# Altium footprint library IC.PcbLib: 204 footprints (part 2 of 13)
Each footprint in its own frame and in the unit in brackets; x right, y up, seen from the top. Pads: shape width x height; smd on the part's side, far side on the other; paste and mask are expansions set on the pad; w line width, h text height; cw(c..) or ccw(c..) is an arc to the next point about the centre after c.
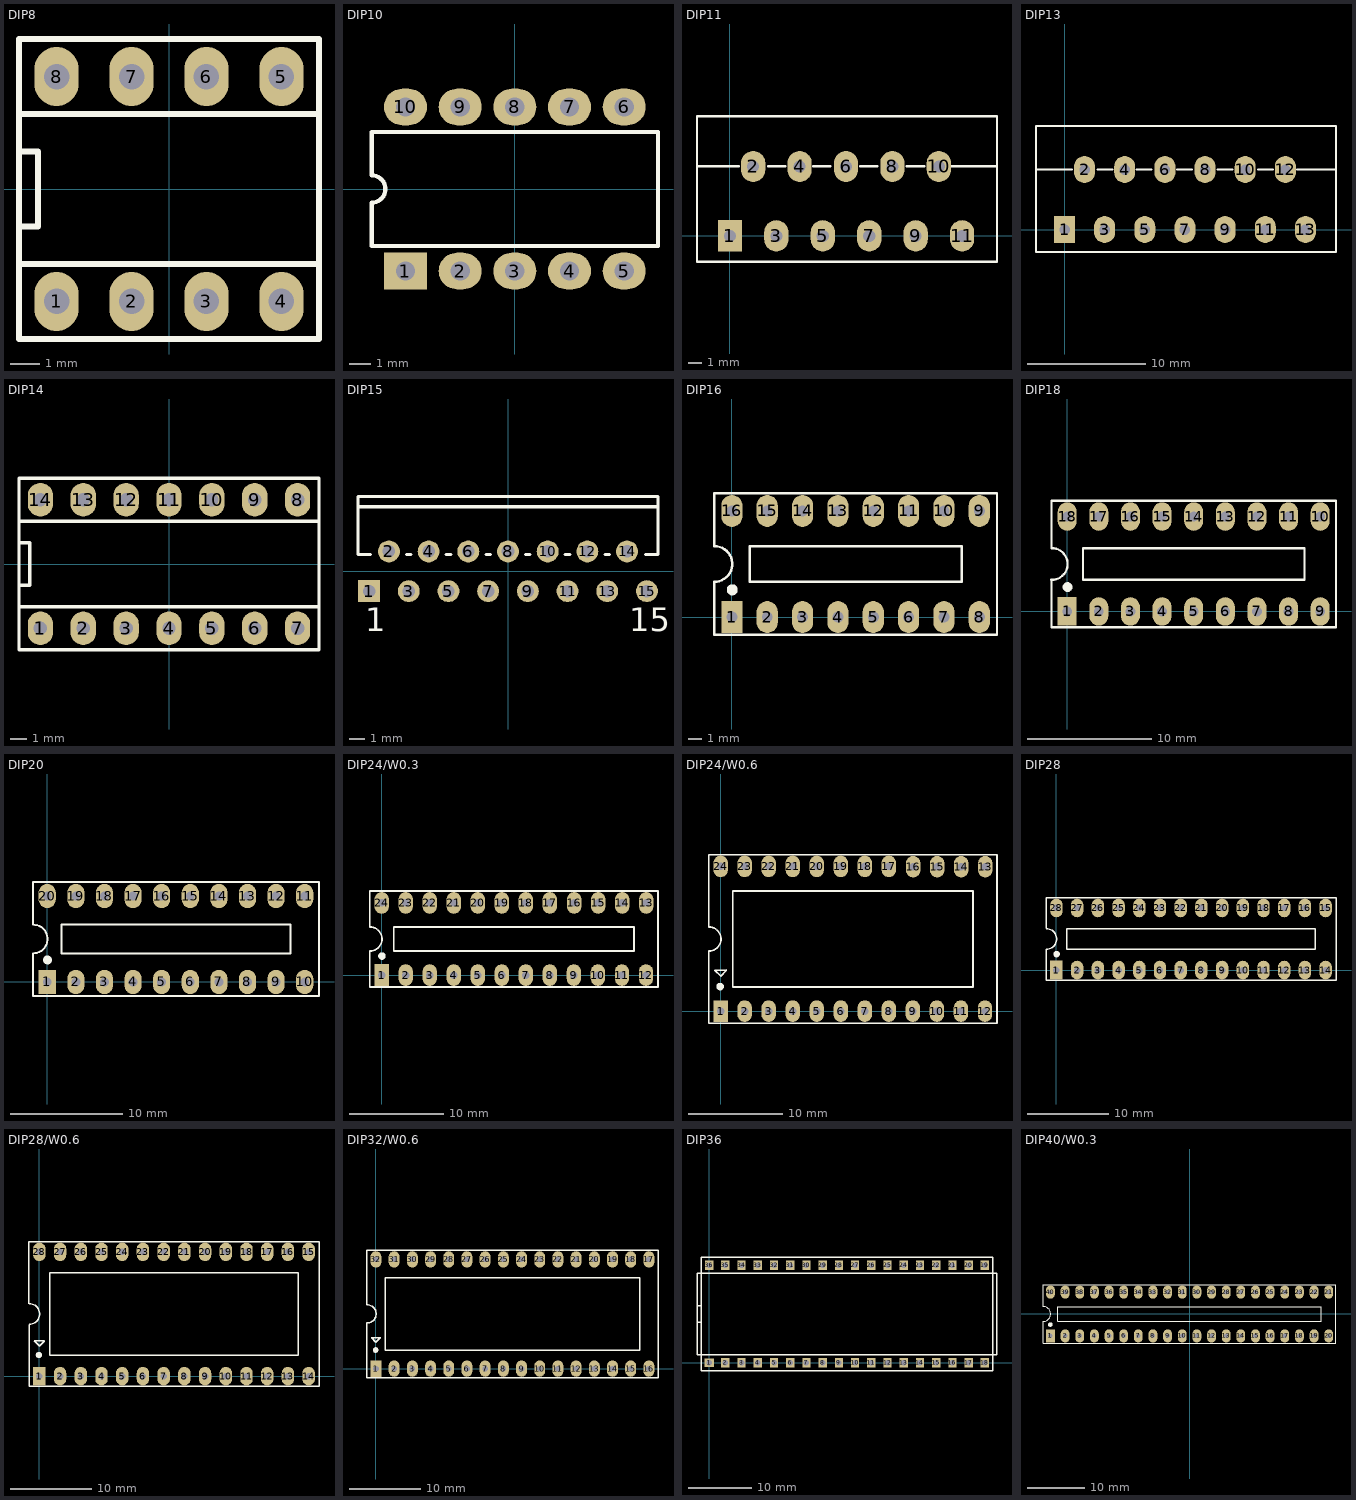
[diagram p1: the footprints below, top view; thin cyan lines are the x and y axes]

## DIP8 [mm] "W.300/L.400"
pads (8):
  oval 1.5x2 hole 0.864: 1(-3.81,-3.81) 2(-1.27,-3.81) 3(1.27,-3.81) 4(3.81,-3.81) 5(3.81,3.81) 6(1.27,3.81) 7(-1.27,3.81) 8(-3.81,3.81)
Top Overlay:
  lines w0.203: -5.08,-2.54 5.08,-2.54 ; -5.08,-2.54 -5.08,2.54 ; -5.08,-2.54 5.08,-2.54 ; -5.08,-2.54 -5.08,2.54 ; -5.08,-2.54 -5.08,-5.08 5.08,-5.08 5.08,2.54 ; -5.08,-2.54 -5.08,-1.27 ; -5.08,-1.27 -4.445,-1.27 ; -5.08,-1.27 -4.445,-1.27 ; -5.08,-1.27 -5.08,1.27 ; -5.08,1.27 -4.445,1.27 ; -5.08,1.27 -4.445,1.27 ; -5.08,1.27 -5.08,5.08 5.08,5.08 5.08,2.54 ; -5.08,2.54 5.08,2.54 ; -5.08,2.54 5.08,2.54 ; -4.445,-1.27 -4.445,1.27 ; -4.445,-1.27 -4.445,1.27 ; 5.08,-2.54 5.08,2.54 ; 5.08,-2.54 5.08,2.54
3D body "User Library-DIP8-300-metric.step": height 4.5, standoff -3.5, extent -5.4,-3.88 5.4,3.88

## DIP10 [mm] "DIP; 10 Leads; Row Spacing 7.62 mm; Pitch 2.54 mm"
height 4.42
pads (10):
  rect 2x1.7 hole 0.9: 1(-5.08,-3.81)
  oval 2x1.7 hole 0.9: 2(-2.54,-3.81) 3(0,-3.81) 4(2.54,-3.81) 5(5.08,-3.81) 6(5.08,3.81) 7(2.54,3.81) 8(0,3.81) 9(-2.54,3.81) 10(-5.08,3.81)
Top Overlay:
  lines w0.2: -6.65,-2.65 6.65,-2.65 6.65,2.65 -6.65,2.65 -6.65,0.635 cw(c-6.65,0) -6.65,-0.635 -6.65,-2.65

## DIP11 [mil] "11 Pin so le hai hang cach nhau 200mil., Pin to pin 100mil"
pads (11):
  rect 70x90 hole 35: 1(0,0)
  oval 70x90 hole 35: 2(66.93,200) 3(133.86,0) 4(200.79,200) 5(267.72,0) 6(334.65,200) 7(401.57,0) 8(468.5,200) 9(535.43,0) 10(602.36,200) 11(669.29,0)
Top Overlay:
  lines w7: -95,200 25,200 ; 110,200 160,200 ; 240,200 290,200 ; 375,200 425,200 ; 510,200 560,200 ; 630,200 770,200 ; -95,-75 770,-75 770,345 -95,345 -95,-75

## DIP13 [mil] "13 Pin so le hai hang cach nhau 200mil., Pin to pin 100mil"
pads (13):
  rect 70x90 hole 35: 1(0,0)
  oval 70x90 hole 35: 2(66.93,200) 3(133.86,0) 4(200.79,200) 5(267.72,0) 6(334.65,200) 7(401.57,0) 8(468.5,200) 9(535.43,0) 10(602.36,200) 11(669.29,0) 12(736.22,200) 13(803.15,0)
Top Overlay:
  lines w7: -95,200 25,200 ; 110,200 160,200 ; 240,200 290,200 ; 375,200 425,200 ; 510,200 560,200 ; 645,200 695,200 ; 775,200 905,200 ; -95,-75 905,-75 905,345 -95,345 -95,-75

## DIP14 [mm] "W.300/L.900"
height 5.59
pads (14):
  oval 1.5x2 hole 0.8: 1(-7.62,-3.81) 2(-5.08,-3.81) 3(-2.54,-3.81) 4(0,-3.81) 5(2.54,-3.81) 6(5.08,-3.81) 7(7.62,-3.81) 8(7.62,3.81) 9(5.08,3.81) 10(2.54,3.81) 11(0,3.81) 12(-2.54,3.81) 13(-5.08,3.81) 14(-7.62,3.81)
Top Overlay:
  lines w0.203: -8.89,-2.54 -8.89,-1.27 ; -8.89,-2.54 -8.89,-1.27 ; -8.89,-2.54 8.89,-2.54 ; -8.89,-2.54 8.89,-2.54 ; -8.89,-1.27 -8.255,-1.27 ; -8.89,-1.27 -8.89,1.27 ; -8.89,-1.27 -8.255,-1.27 ; -8.89,-1.27 -8.89,1.27 ; -8.89,1.27 -8.255,1.27 ; -8.89,1.27 -8.89,2.54 ; -8.89,1.27 -8.255,1.27 ; -8.89,1.27 -8.89,2.54 ; -8.89,2.54 8.89,2.54 ; -8.89,2.54 8.89,2.54 ; -8.255,-1.27 -8.255,1.27 ; -8.255,-1.27 -8.255,1.27 ; 8.89,-2.54 8.89,2.54 ; -8.89,-5.08 8.89,-5.08 8.89,5.08 -8.89,5.08 -8.89,-5.08
3D body "User Library-DIP14-300-metric.step": height 4.5, standoff -3.5, extent -9.05,-3.88 9.05,3.88

## DIP15 [mm] "TO, Thru-Hole, Vertical, Heatsink Mounted; 15 Bent Staggered Leads; Pitch 1.27 mm"
height 17.3
pads (15):
  rect 1.4x1.4 hole 0.8: 1(-8.89,-1.27)
  round 1.4 hole 0.8: 2(-7.62,1.27) 3(-6.35,-1.27) 4(-5.08,1.27) 5(-3.81,-1.27) 6(-2.54,1.27) 7(-1.27,-1.27) 8(0,1.27) 9(1.27,-1.27) 10(2.54,1.27) 11(3.81,-1.27) 12(5.08,1.27) 13(6.35,-1.27) 14(7.62,1.27) 15(8.89,-1.27)
Top Overlay:
  lines w0.2: -9.6,4.13 9.6,4.13 ; -8.8,1.08 -9.6,1.08 -9.6,4.78 9.6,4.78 9.6,1.08 8.8,1.08 ; -6.5,1.08 -6.2,1.08 ; -3.96,1.08 -3.66,1.08 ; -1.42,1.08 -1.12,1.08 ; 1.12,1.08 1.42,1.08 ; 3.66,1.08 3.96,1.08 ; 6.2,1.08 6.5,1.08
  text "15" at 7.765,-3.845 h1.5
  text "1" at -9.14,-3.845 h1.5
3D body "User Library-MULTIWAT T15.step": height 22.74, standoff -2.18, extent -9.8,-1.778 9.8,7.29

## DIP16 [mil] "16 PIN, W 300mil, Pin to pin 100mil"
height 100
pads (16):
  rect 60x90 hole 31: 1(0,0)
  oval 60x90 hole 31: 2(100,0) 3(200,0) 4(300,0) 5(400,0) 6(500,0) 7(600,0) 8(700,0) 9(700,300) 10(600,300) 11(500,300) 12(400,300) 13(300,300) 14(200,300) 15(100,300) 16(0,300)
Top Overlay:
  circle w15: c1,77 r8
  lines w7: -50.38,100.05 ccw(c-48.69,150.02) -50,200 ; -50,100 -50,-50 750,-50 750,350 -49,350 -50,349 ; -50,201 -50,350 ; 50,100 50,200 650,200 650,100 50,100
3D body "SW3dPS-DIP 16 _ socket 214.STEP": height 299.42, standoff -131.12, extent -51.7,-57.39 751.7,356

## DIP18 [mil] "18 PIN, W 300mil, Pin to pin 100mil"
height 100
pads (18):
  rect 60x90 hole 31: 1(0,0)
  oval 60x90 hole 31: 2(100,0) 3(200,0) 4(300,0) 5(400,0) 6(500,0) 7(600,0) 8(700,0) 9(800,0) 10(800,300) 11(700,300) 12(600,300) 13(500,300) 14(400,300) 15(300,300) 16(200,300) 17(100,300) 18(0,300)
Top Overlay:
  circle w15: c1,77 r8
  lines w7: -50.38,100.05 ccw(c-48.69,150.02) -50,200 ; -50,100 -50,-50 850,-50 850,350 -50,350 -50,201 ; 50,100 50,200 750,200 750,100 50,100
3D body "SW3dPS-DIP18.STEP": height 118.71, standoff -131.12, extent -51.18,-57.39 849.18,356

## DIP20 [mil] "DIP 20, 20 PIN, W 300mil, Pin to pin 100mil"
height 100
pads (20):
  rect 60x85 hole 31: 1(0,0)
  oval 60x85 hole 31: 2(100,0) 3(200,0) 4(300,0) 5(400,0) 6(500,0) 7(600,0) 8(700,0) 9(800,0) 10(900,0) 11(900,300) 12(800,300) 13(700,300) 14(600,300) 15(500,300) 16(400,300) 17(300,300) 18(200,300) 19(100,300) 20(0,300)
Top Overlay:
  circle w15: c1,77 r8
  lines w7: -50.38,100.05 ccw(c-48.69,150.02) -50,200 ; -50,100 -50,-50 950,-50 950,350 -50,350 -50,201 ; 50,100 850,100 850,200 50,200 50,100
3D body "User Library-20-pin-dip.STEP": height 155, standoff -130, extent -91,-18 945,322

## DIP24/W0.3 [mil] "DIP24/W.300, Pin to pin 100mil"
height 100
pads (24):
  rect 60x90 hole 31: 1(0,0)
  oval 60x90 hole 31: 2(100,0) 3(200,0) 4(300,0) 5(400,0) 6(500,0) 7(600,0) 8(700,0) 9(800,0) 10(900,0) 11(1000,0) 12(1100,0) 13(1101,300) 14(1001,300) 15(901,300) 16(801,300) 17(700,300) 18(600,300) 19(500,300) 20(400,300) 21(300,300) 22(200,300) 23(100,300) 24(0,300)
Top Overlay:
  circle w15: c1,79 r8
  lines w7: -50.38,100.05 ccw(c-48.69,150.02) -50,200 ; -50,100 -50,-50 1150,-50 1150,350 -50,350 -50,201 ; 50,100 1050,100 1050,200 50,200 50,100
3D body "SW3dPS-DIP24-300.STEP": height 200, standoff -98.03, extent -89.04,-2.92 1181.04,306.92

## DIP24/W0.6 [mil] "DIP24/W.600, Pin to pin 100mil"
height 100
pads (24):
  rect 60x90 hole 31: 1(0,0)
  oval 60x90 hole 31: 2(100,0) 3(200,0) 4(300,0) 5(400,0) 6(500,0) 7(600,0) 8(700,0) 9(800,0) 10(900,0) 11(1000,0) 12(1100,0) 13(1101,601) 14(1001,601) 15(901,601) 16(801,601) 17(700,602) 18(600,602) 19(500,602) 20(400,602) 21(300,602) 22(200,602) 23(100,602) 24(0,602)
Top Overlay:
  circle w15: c-2,102 r8
  lines w7: -50,350 -50,650 1150,650 1150,-50 -50,-50 -50,250 ccw(c-48.31,299.97) -49.62,349.95 ; -25,170 23,170 24,171 24,169 0,145 0,146 -24,170 -25,170 ; 50,100 50,500 1050,500 1050,100 50,100
3D body "SW3DPS-DIP 24 IC WITH 0_280IN WINDOW-DEFAULT.STEP": height 227.95, standoff -129.92, extent -82.52,0.16 1202.52,600

## DIP28 [mil] "28 PIN, W 300mil, Pin to pin 100mil"
height 100
pads (28):
  rect 60x90 hole 31: 1(0,0)
  oval 60x90 hole 31: 2(100,0) 3(200,0) 4(300,0) 5(400,0) 6(500,0) 7(600,0) 8(700,0) 9(800,0) 10(900,0) 11(1000,0) 12(1100,0) 13(1200,0) 14(1300,0) 15(1300,300) 16(1200,300) 17(1100,300) 18(1000,300) 19(900,300) 20(800,300) 21(700,300) 22(600,300) 23(500,300) 24(400,300) 25(300,300) 26(200,300) 27(100,300) 28(0,300)
Top Overlay:
  circle w15: c1,77 r8
  lines w7: -50.38,100.05 ccw(c-48.69,150.02) -50,200 ; -50,100 -50,-50 1350,-50 1350,350 -50,350 -50,201 ; 50,100 50,200 1250,200 1250,100 50,100
3D body "SW3dPS-DIP28-300.STEP": height 200, standoff -98.03, extent -50,-10 1367.32,299.84

## DIP28/W0.6 [mil] "DIP28/W.600, Pin to pin 100mil"
height 100
pads (28):
  rect 60x90 hole 31: 1(0,0)
  oval 60x90 hole 31: 2(100,0) 3(200,0) 4(300,0) 5(400,0) 6(500,0) 7(600,0) 8(700,0) 9(800,0) 10(900,0) 11(1000,0) 12(1100,0) 13(1200,0) 14(1300,0) 15(1300,600) 16(1200,600) 17(1100,600) 18(1000,600) 19(900,600) 20(800,600) 21(700,600) 22(600,600) 23(500,600) 24(400,600) 25(300,600) 26(200,600) 27(100,600) 28(0,600)
Top Overlay:
  circle w15: c-2,102 r8
  lines w7: -51,350 -51,650 1350,650 1350,-50 -50,-50 -50,249 ; -50,250 ccw(c-48.31,299.97) -49.62,349.95 ; -25,170 23,170 24,171 24,169 0,145 0,146 -24,170 -25,170 ; 50,100 50,500 1250,500 1250,100 50,100
3D body "SW3dPS-DIP28-600.STEP": height 224.41, standoff -101.57, extent -84.25,0.16 1384.25,610

## DIP32/W0.6 [mil] "DIP32/W.600, Pin to pin 100mil"
height 100
pads (32):
  rect 60x90 hole 31: 1(0,0)
  oval 60x90 hole 31: 2(100,0) 3(200,0) 4(300,0) 5(400,0) 6(500,0) 7(600,0) 8(700,0) 9(800,0) 10(900,0) 11(1000,0) 12(1100,0) 13(1200,0) 14(1300,0) 15(1400,0) 16(1500,0) 17(1500,600) 18(1400,600) 19(1300,600) 20(1200,600) 21(1100,600) 22(1000,600) 23(900,600) 24(800,600) 25(700,600) 26(600,600) 27(500,600) 28(400,600) 29(300,600) 30(200,600) 31(100,600) 32(0,600)
Top Overlay:
  circle w15: c-2,102 r8
  lines w7: -50.38,251.05 ccw(c-48.69,301.02) -50,351 ; -50,251 -50,-50 1550,-50 1550,650 -50,650 -50,352 ; -25,170 -24,170 0,146 0,145 24,169 24,171 23,170 -25,170 ; 50,100 50,500 1450,500 1450,100 50,100
3D body "SW3DPS-DIP 32 IC WITH 0_380IN WINDOW-DEFAULT.STEP": height 227.95, standoff -129.92, extent -77.56,0 1577.56,601.81

## DIP36 [mil] "W.600/L1.850"
pads (36):
  rect 59x51 / inner rect 58x58 / far side rect 59x51 hole 34: 1(0,0)
  rect 51x59 / inner round 58 / far side rect 51x59 hole 34: 2(100,0) 3(200,0) 4(300,0) 5(400,0) 6(500,0) 7(600,0) 8(700,0) 9(800,0) 10(900,0) 11(1000,0) 12(1100,0) 13(1200,0) 14(1300,0) 15(1400,0) 16(1500,0) 17(1600,0) 18(1700,0) 19(1700,600) 20(1600,600) 21(1500,600) 22(1400,600) 23(1300,600) 24(1200,600) 25(1100,600) 26(1000,600) 27(900,600) 28(800,600) 29(700,600) 30(600,600) 31(500,600) 32(400,600) 33(300,600) 34(200,600) 35(100,600) 36(0,600)
Top Overlay:
  lines w8: -75,50 -75,250 ; -75,50 1775,50 ; -75,50 -75,250 ; -75,50 1775,50 ; -75,250 -50,250 ; -75,250 -75,350 ; -75,250 -50,250 ; -75,250 -75,350 ; -75,350 -50,350 ; -75,350 -75,550 ; -75,350 -50,350 ; -75,350 -75,550 ; -75,550 1775,550 ; -75,550 1775,550 ; -50,250 -50,350 ; -50,250 -50,350 ; -50,350 -50,650 1750,650 1750,-50 -50,-50 -50,350 ; 1775,50 1775,550 ; 1775,50 1775,550

## DIP40/W0.3 [mil] "40 PIN, W 300mil, Pin to pin 100mil"
height 100
pads (40):
  rect 60x90 hole 31: 1(-950,-150)
  oval 60x90 hole 31: 2(-850,-150) 3(-750,-150) 4(-650,-150) 5(-550,-150) 6(-450,-150) 7(-350,-150) 8(-250,-150) 9(-150,-150) 10(-50,-150) 11(50,-150) 12(150,-150) 13(250,-150) 14(350,-150) 15(450,-150) 16(550,-150) 17(650,-150) 18(750,-150) 19(850,-150) 20(950,-150) 21(950,150) 22(850,150) 23(750,150) 24(650,150) 25(550,150) 26(450,150) 27(350,150) 28(250,150) 29(150,150) 30(50,150) 31(-50,150) 32(-150,150) 33(-250,150) 34(-350,150) 35(-450,150) 36(-550,150) 37(-650,150) 38(-750,150) 39(-850,150) 40(-950,150)
Top Overlay:
  circle w15: c-951,-72 r8
  lines w7: -1000.38,-49.95 ccw(c-998.68,0.02) -1000,50 ; -1000,-50 -1000,-200 1000,-200 1000,200 -1000,200 -1000,51 ; -900,-50 -900,50 900,50 900,-50 -900,-50
3D body "SW3DPS-DIP 40 IC WITH 0_320IN WINDOW-DEFAULT.STEP": height 227.95, standoff -129.92, extent -1020,-310.91 1050.87,290.91